# Altium footprint library Package_DFN_QFN.PcbLib: 735 footprints (part 39 of 46)
Each footprint in its own frame and in the unit in brackets; x right, y up, seen from the top. Pads: shape width x height; smd on the part's side, far side on the other; paste and mask are expansions set on the pad; w line width, h text height; cw(c..) or ccw(c..) is an arc to the next point about the centre after c.
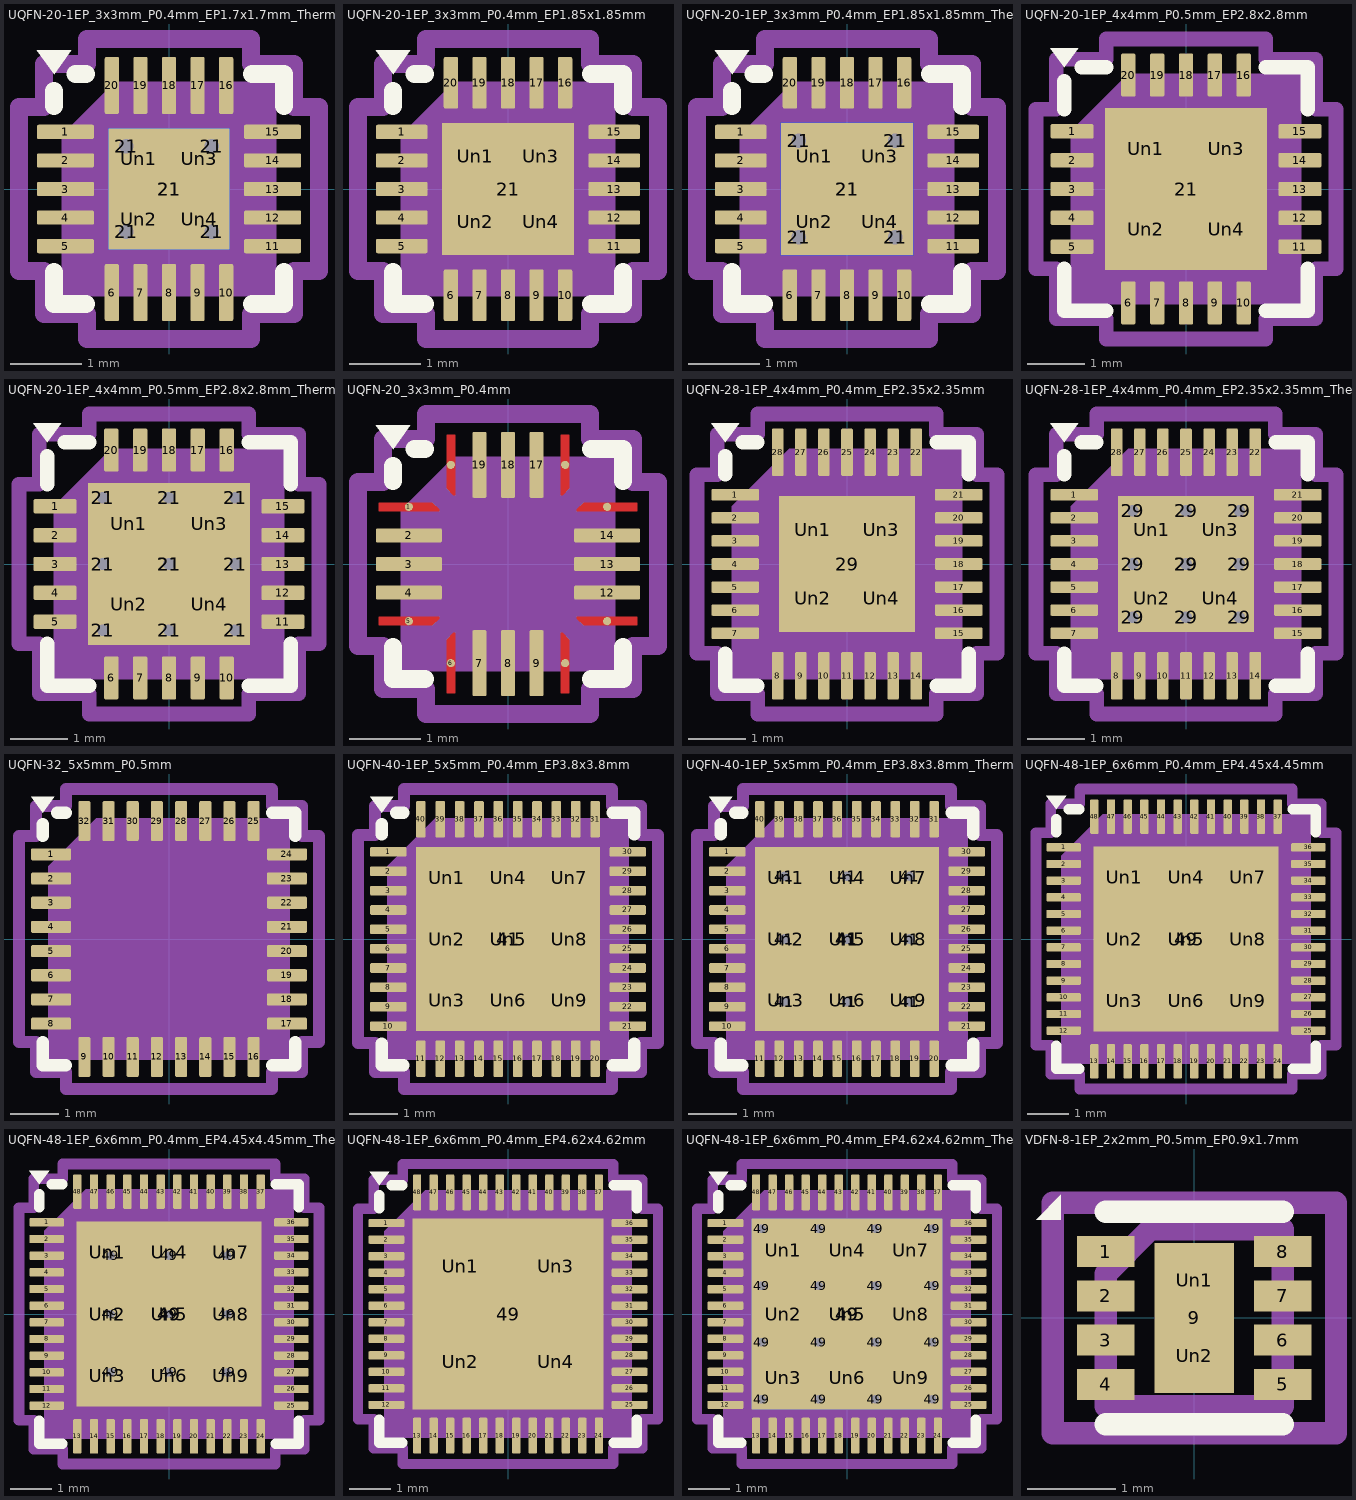
[diagram p38: the footprints below, top view; thin cyan lines are the x and y axes]

## UQFN-20-1EP_3x3mm_P0.4mm_EP1.7x1.7mm_ThermalVias [mm] "UQFN-20-1EP_3x3mm_P0.4mm_EP1.7x1.7mm_ThermalVias"
pads (30):
  rrect25% 0.8x0.2 smd: 1(-1.45,0.8) 2(-1.45,0.4) 3(-1.45,0) 4(-1.45,-0.4) 5(-1.45,-0.8) 11(1.45,-0.8) 12(1.45,-0.4) 13(1.45,0) 14(1.45,0.4) 15(1.45,0.8)
  rrect25% 0.2x0.8 smd: 6(-0.8,-1.45) 7(-0.4,-1.45) 8(0,-1.45) 9(0.4,-1.45) 10(0.8,-1.45) 16(0.8,1.45) 17(0.4,1.45) 18(0,1.45) 19(-0.4,1.45) 20(-0.8,1.45)
  round 0.5 hole 0.2: 21(-0.6,-0.6) 21(-0.6,0.6) 21(0.6,-0.6) 21(0.6,0.6)
  rect 1.7x1.7 smd: 21(0,0)
  rect 1.7x1.7 smd far side: 21(0,0)
  rrect25% 0.74x0.74 on Top Paste: Un1(-0.425,0.425) Un2(-0.425,-0.425) Un3(0.425,0.425) Un4(0.425,-0.425)
F.SilkS:
  region: -1.61,1.61 -1.85,1.94 -1.37,1.94
  lines w0.254: -1.61,-1.16 -1.61,-1.61 -1.16,-1.61 ; -1.61,1.16 -1.61,1.37 ; -1.31,1.61 -1.16,1.61 ; 1.16,-1.61 1.61,-1.61 1.61,-1.16 ; 1.16,1.61 1.61,1.61 1.61,1.16
Top Component Center:
  lines w0.127: -0.127,0 0.127,0 -0.127,0 ; 0,-0.127 0,0.127 0,-0.127
Top Assembly:
  region: 1.5,-1.5 -1.5,-1.5 -1.5,0.75 -0.75,1.5 1.5,1.5
Top Courtyard:
  lines w0.254: -2.1,-1.15 -2.1,1.15 -1.75,1.15 -1.75,1.75 -1.15,1.75 -1.15,2.1 1.15,2.1 1.15,1.75 1.75,1.75 1.75,1.15 2.1,1.15 2.1,-1.15 1.75,-1.15 1.75,-1.75 1.15,-1.75 1.15,-2.1 -1.15,-2.1 -1.15,-1.75 -1.75,-1.75 -1.75,-1.15 -2.1,-1.15
Top Designator:
  text ".Designator" at -3.43,-0.344 h1.52
3D body "UQFN-20-1EP_3x3mm_P0.4mm_EP1.85x1.85mm.step": height 0.52, standoff 0, extent -1.5,-1.5 1.5,1.5

## UQFN-20-1EP_3x3mm_P0.4mm_EP1.85x1.85mm [mm] "UQFN-20-1EP_3x3mm_P0.4mm_EP1.85x1.85mm"
pads (25):
  rrect25% 0.725x0.2 smd: 1(-1.488,0.8) 2(-1.488,0.4) 3(-1.488,0) 4(-1.488,-0.4) 5(-1.488,-0.8) 11(1.488,-0.8) 12(1.488,-0.4) 13(1.488,0) 14(1.488,0.4) 15(1.488,0.8)
  rrect25% 0.2x0.725 smd: 6(-0.8,-1.488) 7(-0.4,-1.488) 8(0,-1.488) 9(0.4,-1.488) 10(0.8,-1.488) 16(0.8,1.488) 17(0.4,1.488) 18(0,1.488) 19(-0.4,1.488) 20(-0.8,1.488)
  rect 1.85x1.85 smd: 21(0,0)
  rrect25% 0.75x0.75 on Top Paste: Un1(-0.46,0.46) Un2(-0.46,-0.46) Un3(0.46,0.46) Un4(0.46,-0.46)
F.SilkS:
  region: -1.61,1.61 -1.85,1.94 -1.37,1.94
  lines w0.254: -1.61,-1.16 -1.61,-1.61 -1.16,-1.61 ; -1.61,1.16 -1.61,1.37 ; -1.31,1.61 -1.16,1.61 ; 1.16,-1.61 1.61,-1.61 1.61,-1.16 ; 1.16,1.61 1.61,1.61 1.61,1.16
Top Component Center:
  lines w0.127: -0.127,0 0.127,0 -0.127,0 ; 0,-0.127 0,0.127 0,-0.127
Top Assembly:
  region: 1.5,-1.5 -1.5,-1.5 -1.5,0.75 -0.75,1.5 1.5,1.5
Top Courtyard:
  lines w0.254: -2.1,-1.15 -1.75,-1.15 -1.75,-1.75 -1.15,-1.75 -1.15,-2.1 1.15,-2.1 1.15,-1.75 1.75,-1.75 1.75,-1.15 2.1,-1.15 2.1,1.15 1.75,1.15 1.75,1.75 1.15,1.75 1.15,2.1 -1.15,2.1 -1.15,1.75 -1.75,1.75 -1.75,1.15 -2.1,1.15 -2.1,-1.15
Top Designator:
  text ".Designator" at -3.43,-0.344 h1.52
3D body "UQFN-20-1EP_3x3mm_P0.4mm_EP1.85x1.85mm.step": height 0.52, standoff 0, extent -1.5,-1.5 1.5,1.5

## UQFN-20-1EP_3x3mm_P0.4mm_EP1.85x1.85mm_ThermalVias [mm] "UQFN-20-1EP_3x3mm_P0.4mm_EP1.85x1.85mm_ThermalVias"
pads (30):
  rrect25% 0.725x0.2 smd: 1(-1.488,0.8) 2(-1.488,0.4) 3(-1.488,0) 4(-1.488,-0.4) 5(-1.488,-0.8) 11(1.488,-0.8) 12(1.488,-0.4) 13(1.488,0) 14(1.488,0.4) 15(1.488,0.8)
  rrect25% 0.2x0.725 smd: 6(-0.8,-1.488) 7(-0.4,-1.488) 8(0,-1.488) 9(0.4,-1.488) 10(0.8,-1.488) 16(0.8,1.488) 17(0.4,1.488) 18(0,1.488) 19(-0.4,1.488) 20(-0.8,1.488)
  round 0.5 hole 0.2: 21(-0.675,-0.675) 21(-0.675,0.675) 21(0.675,-0.675) 21(0.675,0.675)
  rect 1.85x1.85 smd: 21(0,0)
  rect 1.85x1.85 smd far side: 21(0,0)
  rrect25% 0.8x0.8 on Top Paste: Un1(-0.46,0.46) Un2(-0.46,-0.46) Un3(0.46,0.46) Un4(0.46,-0.46)
F.SilkS:
  region: -1.61,1.61 -1.85,1.94 -1.37,1.94
  lines w0.254: -1.61,-1.16 -1.61,-1.61 -1.16,-1.61 ; -1.61,1.16 -1.61,1.37 ; -1.31,1.61 -1.16,1.61 ; 1.16,-1.61 1.61,-1.61 1.61,-1.16 ; 1.16,1.61 1.61,1.61 1.61,1.16
Top Component Center:
  lines w0.127: -0.127,0 0.127,0 -0.127,0 ; 0,-0.127 0,0.127 0,-0.127
Top Assembly:
  region: 1.5,-1.5 -1.5,-1.5 -1.5,0.75 -0.75,1.5 1.5,1.5
Top Courtyard:
  lines w0.254: -2.1,-1.15 -2.1,1.15 -1.75,1.15 -1.75,1.75 -1.15,1.75 -1.15,2.1 1.15,2.1 1.15,1.75 1.75,1.75 1.75,1.15 2.1,1.15 2.1,-1.15 1.75,-1.15 1.75,-1.75 1.15,-1.75 1.15,-2.1 -1.15,-2.1 -1.15,-1.75 -1.75,-1.75 -1.75,-1.15 -2.1,-1.15
Top Designator:
  text ".Designator" at -3.43,-0.344 h1.52
3D body "UQFN-20-1EP_3x3mm_P0.4mm_EP1.85x1.85mm.step": height 0.52, standoff 0, extent -1.5,-1.5 1.5,1.5

## UQFN-20-1EP_4x4mm_P0.5mm_EP2.8x2.8mm [mm] "UQFN-20-1EP_4x4mm_P0.5mm_EP2.8x2.8mm"
pads (25):
  rrect25% 0.75x0.25 smd: 1(-1.975,1) 2(-1.975,0.5) 3(-1.975,0) 4(-1.975,-0.5) 5(-1.975,-1) 11(1.975,-1) 12(1.975,-0.5) 13(1.975,0) 14(1.975,0.5) 15(1.975,1)
  rrect25% 0.25x0.75 smd: 6(-1,-1.975) 7(-0.5,-1.975) 8(0,-1.975) 9(0.5,-1.975) 10(1,-1.975) 16(1,1.975) 17(0.5,1.975) 18(0,1.975) 19(-0.5,1.975) 20(-1,1.975)
  rect 2.8x2.8 smd: 21(0,0)
  rrect22% 1.13x1.13 on Top Paste: Un1(-0.7,0.7) Un2(-0.7,-0.7) Un3(0.7,0.7) Un4(0.7,-0.7)
F.SilkS:
  region: -2.11,2.11 -2.35,2.44 -1.87,2.44
  lines w0.254: -2.11,-1.385 -2.11,-2.11 -1.385,-2.11 ; -2.11,1.385 -2.11,1.87 ; -1.81,2.11 -1.385,2.11 ; 1.385,-2.11 2.11,-2.11 2.11,-1.385 ; 1.385,2.11 2.11,2.11 2.11,1.385
Top Component Center:
  lines w0.127: -0.127,0 0.127,0 -0.127,0 ; 0,-0.127 0,0.127 0,-0.127
Top Assembly:
  region: 2,-2 -2,-2 -2,1 -1,2 2,2
Top Courtyard:
  lines w0.254: -2.6,-1.38 -2.25,-1.38 -2.25,-2.25 -1.38,-2.25 -1.38,-2.6 1.38,-2.6 1.38,-2.25 2.25,-2.25 2.25,-1.38 2.6,-1.38 2.6,1.38 2.25,1.38 2.25,2.25 1.38,2.25 1.38,2.6 -1.38,2.6 -1.38,2.25 -2.25,2.25 -2.25,1.38 -2.6,1.38 -2.6,-1.38
Top Designator:
  text ".Designator" at -3.43,-0.344 h1.52
3D body "UQFN-20-1EP_4x4mm_P0.5mm_EP2.8x2.8mm.step": height 0.62, standoff 0, extent -2,-2 2,2

## UQFN-20-1EP_4x4mm_P0.5mm_EP2.8x2.8mm_ThermalVias [mm] "UQFN-20-1EP_4x4mm_P0.5mm_EP2.8x2.8mm_ThermalVias"
pads (35):
  rrect25% 0.75x0.25 smd: 1(-1.975,1) 2(-1.975,0.5) 3(-1.975,0) 4(-1.975,-0.5) 5(-1.975,-1) 11(1.975,-1) 12(1.975,-0.5) 13(1.975,0) 14(1.975,0.5) 15(1.975,1)
  rrect25% 0.25x0.75 smd: 6(-1,-1.975) 7(-0.5,-1.975) 8(0,-1.975) 9(0.5,-1.975) 10(1,-1.975) 16(1,1.975) 17(0.5,1.975) 18(0,1.975) 19(-0.5,1.975) 20(-1,1.975)
  round 0.5 hole 0.2: 21(-1.15,-1.15) 21(-1.15,0) 21(-1.15,1.15) 21(0,-1.15) 21(0,0) 21(0,1.15) 21(1.15,-1.15) 21(1.15,0) 21(1.15,1.15)
  rect 2.8x2.8 smd: 21(0,0)
  rect 2.8x2.8 smd far side: 21(0,0)
  rrect21% 1.17x1.17 on Top Paste: Un1(-0.7,0.7) Un2(-0.7,-0.7) Un3(0.7,0.7) Un4(0.7,-0.7)
F.SilkS:
  region: -2.11,2.11 -2.35,2.44 -1.87,2.44
  lines w0.254: -2.11,-1.385 -2.11,-2.11 -1.385,-2.11 ; -2.11,1.385 -2.11,1.87 ; -1.81,2.11 -1.385,2.11 ; 1.385,-2.11 2.11,-2.11 2.11,-1.385 ; 1.385,2.11 2.11,2.11 2.11,1.385
Top Component Center:
  lines w0.127: -0.127,0 0.127,0 -0.127,0 ; 0,-0.127 0,0.127 0,-0.127
Top Assembly:
  region: 2,-2 -2,-2 -2,1 -1,2 2,2
Top Courtyard:
  lines w0.254: -2.6,-1.38 -2.6,1.38 -2.25,1.38 -2.25,2.25 -1.38,2.25 -1.38,2.6 1.38,2.6 1.38,2.25 2.25,2.25 2.25,1.38 2.6,1.38 2.6,-1.38 2.25,-1.38 2.25,-2.25 1.38,-2.25 1.38,-2.6 -1.38,-2.6 -1.38,-2.25 -2.25,-2.25 -2.25,-1.38 -2.6,-1.38
Top Designator:
  text ".Designator" at -3.43,-0.344 h1.52
3D body "UQFN-20-1EP_4x4mm_P0.5mm_EP2.8x2.8mm.step": height 0.62, standoff 0, extent -2,-2 2,2

## UQFN-20_3x3mm_P0.4mm [mm] "UQFN-20_3x3mm_P0.4mm"
pads (20):
  round 0.115 smd: 1(-1.388,0.8) 5(-1.388,-0.8) 6(-0.8,-1.388) 10(0.8,-1.388) 11(1.388,-0.8) 15(1.388,0.8) 16(0.8,1.388) 20(-0.8,1.388)
  rrect25% 0.925x0.2 smd: 2(-1.388,0.4) 3(-1.388,0) 4(-1.388,-0.4) 12(1.388,-0.4) 13(1.388,0) 14(1.388,0.4)
  rrect25% 0.2x0.925 smd: 7(-0.4,-1.388) 8(0,-1.388) 9(0.4,-1.388) 17(0.4,1.388) 18(0,1.388) 19(-0.4,1.388)
F.Cu:
  region: -0.74,0.965 -0.763,0.965 -0.86,1.062 -0.86,1.81 -0.74,1.81
  region: 0.86,1.062 0.763,0.965 0.74,0.965 0.74,1.81 0.86,1.81
  region: 1.81,0.74 0.965,0.74 0.965,0.763 1.062,0.86 1.81,0.86
  region: 1.81,-0.86 1.062,-0.86 0.965,-0.763 0.965,-0.74 1.81,-0.74
  region: 0.86,-1.062 0.86,-1.81 0.74,-1.81 0.74,-0.965 0.763,-0.965
  region: -0.74,-1.81 -0.86,-1.81 -0.86,-1.062 -0.763,-0.965 -0.74,-0.965
  region: -0.965,-0.763 -1.062,-0.86 -1.81,-0.86 -1.81,-0.74 -0.965,-0.74
  region: -0.965,0.763 -0.965,0.74 -1.81,0.74 -1.81,0.86 -1.062,0.86
F.SilkS:
  region: -1.61,1.61 -1.85,1.94 -1.37,1.94
  lines w0.254: -1.61,-1.16 -1.61,-1.61 -1.16,-1.61 ; -1.61,1.16 -1.61,1.37 ; -1.31,1.61 -1.16,1.61 ; 1.16,-1.61 1.61,-1.61 1.61,-1.16 ; 1.16,1.61 1.61,1.61 1.61,1.16
F.Paste:
  region: -0.74,0.965 -0.763,0.965 -0.86,1.062 -0.86,1.81 -0.74,1.81
  region: 0.86,1.062 0.763,0.965 0.74,0.965 0.74,1.81 0.86,1.81
  region: 1.81,0.74 0.965,0.74 0.965,0.763 1.062,0.86 1.81,0.86
  region: 1.81,-0.86 1.062,-0.86 0.965,-0.763 0.965,-0.74 1.81,-0.74
  region: 0.86,-1.062 0.86,-1.81 0.74,-1.81 0.74,-0.965 0.763,-0.965
  region: -0.74,-1.81 -0.86,-1.81 -0.86,-1.062 -0.763,-0.965 -0.74,-0.965
  region: -0.965,-0.763 -1.062,-0.86 -1.81,-0.86 -1.81,-0.74 -0.965,-0.74
  region: -0.965,0.763 -0.965,0.74 -1.81,0.74 -1.81,0.86 -1.062,0.86
F.Mask:
  region: -0.74,0.965 -0.763,0.965 -0.86,1.062 -0.86,1.81 -0.74,1.81
  region: 0.86,1.062 0.763,0.965 0.74,0.965 0.74,1.81 0.86,1.81
  region: 1.81,0.74 0.965,0.74 0.965,0.763 1.062,0.86 1.81,0.86
  region: 1.81,-0.86 1.062,-0.86 0.965,-0.763 0.965,-0.74 1.81,-0.74
  region: 0.86,-1.062 0.86,-1.81 0.74,-1.81 0.74,-0.965 0.763,-0.965
  region: -0.74,-1.81 -0.86,-1.81 -0.86,-1.062 -0.763,-0.965 -0.74,-0.965
  region: -0.965,-0.763 -1.062,-0.86 -1.81,-0.86 -1.81,-0.74 -0.965,-0.74
  region: -0.965,0.763 -0.965,0.74 -1.81,0.74 -1.81,0.86 -1.062,0.86
Top Component Center:
  lines w0.127: -0.127,0 0.127,0 -0.127,0 ; 0,-0.127 0,0.127 0,-0.127
Top Assembly:
  region: 1.5,-1.5 -1.5,-1.5 -1.5,0.75 -0.75,1.5 1.5,1.5
Top Courtyard:
  lines w0.254: -2.1,-1.15 -1.75,-1.15 -1.75,-1.75 -1.15,-1.75 -1.15,-2.1 1.15,-2.1 1.15,-1.75 1.75,-1.75 1.75,-1.15 2.1,-1.15 2.1,1.15 1.75,1.15 1.75,1.75 1.15,1.75 1.15,2.1 -1.15,2.1 -1.15,1.75 -1.75,1.75 -1.75,1.15 -2.1,1.15 -2.1,-1.15
Top Designator:
  text ".Designator" at -3.43,-0.344 h1.52

## UQFN-28-1EP_4x4mm_P0.4mm_EP2.35x2.35mm [mm] "UQFN-28-1EP_4x4mm_P0.4mm_EP2.35x2.35mm"
pads (33):
  rrect25% 0.825x0.2 smd: 1(-1.937,1.2) 2(-1.937,0.8) 3(-1.937,0.4) 4(-1.937,0) 5(-1.937,-0.4) 6(-1.937,-0.8) 7(-1.937,-1.2) 15(1.937,-1.2) 16(1.937,-0.8) 17(1.937,-0.4) 18(1.937,0) 19(1.937,0.4) 20(1.937,0.8) 21(1.937,1.2)
  rrect25% 0.2x0.825 smd: 8(-1.2,-1.937) 9(-0.8,-1.937) 10(-0.4,-1.937) 11(0,-1.937) 12(0.4,-1.937) 13(0.8,-1.937) 14(1.2,-1.937) 22(1.2,1.937) 23(0.8,1.937) 24(0.4,1.937) 25(0,1.937) 26(-0.4,1.937) 27(-0.8,1.937) 28(-1.2,1.937)
  rect 2.35x2.35 smd: 29(0,0)
  rrect25% 0.95x0.95 on Top Paste: Un1(-0.59,0.59) Un2(-0.59,-0.59) Un3(0.59,0.59) Un4(0.59,-0.59)
F.SilkS:
  region: -2.11,2.11 -2.35,2.44 -1.87,2.44
  lines w0.254: -2.11,-1.56 -2.11,-2.11 -1.56,-2.11 ; -2.11,1.56 -2.11,1.87 ; -1.81,2.11 -1.56,2.11 ; 1.56,-2.11 2.11,-2.11 2.11,-1.56 ; 1.56,2.11 2.11,2.11 2.11,1.56
Top Component Center:
  lines w0.127: -0.127,0 0.127,0 -0.127,0 ; 0,-0.127 0,0.127 0,-0.127
Top Assembly:
  region: 2,-2 -2,-2 -2,1 -1,2 2,2
Top Courtyard:
  lines w0.254: -2.6,-1.55 -2.25,-1.55 -2.25,-2.25 -1.55,-2.25 -1.55,-2.6 1.55,-2.6 1.55,-2.25 2.25,-2.25 2.25,-1.55 2.6,-1.55 2.6,1.55 2.25,1.55 2.25,2.25 1.55,2.25 1.55,2.6 -1.55,2.6 -1.55,2.25 -2.25,2.25 -2.25,1.55 -2.6,1.55 -2.6,-1.55
Top Designator:
  text ".Designator" at -3.43,-0.344 h1.52
3D body "UQFN-28-1EP_4x4mm_P0.4mm_EP2.35x2.35mm.step": height 0.57, standoff 0, extent -2,-2 2,2

## UQFN-28-1EP_4x4mm_P0.4mm_EP2.35x2.35mm_ThermalVias [mm] "UQFN-28-1EP_4x4mm_P0.4mm_EP2.35x2.35mm_ThermalVias"
pads (43):
  rrect25% 0.825x0.2 smd: 1(-1.937,1.2) 2(-1.937,0.8) 3(-1.937,0.4) 4(-1.937,0) 5(-1.937,-0.4) 6(-1.937,-0.8) 7(-1.937,-1.2) 15(1.937,-1.2) 16(1.937,-0.8) 17(1.937,-0.4) 18(1.937,0) 19(1.937,0.4) 20(1.937,0.8) 21(1.937,1.2)
  rrect25% 0.2x0.825 smd: 8(-1.2,-1.937) 9(-0.8,-1.937) 10(-0.4,-1.937) 11(0,-1.937) 12(0.4,-1.937) 13(0.8,-1.937) 14(1.2,-1.937) 22(1.2,1.937) 23(0.8,1.937) 24(0.4,1.937) 25(0,1.937) 26(-0.4,1.937) 27(-0.8,1.937) 28(-1.2,1.937)
  round 0.5 hole 0.2: 29(-0.925,-0.925) 29(-0.925,0) 29(-0.925,0.925) 29(0,-0.925) 29(0,0) 29(0,0.925) 29(0.925,-0.925) 29(0.925,0) 29(0.925,0.925)
  rect 2.35x2.35 smd: 29(0,0)
  rect 2.35x2.35 smd far side: 29(0,0)
  rrect25% 0.98x0.98 on Top Paste: Un1(-0.59,0.59) Un2(-0.59,-0.59) Un3(0.59,0.59) Un4(0.59,-0.59)
F.SilkS:
  region: -2.11,2.11 -2.35,2.44 -1.87,2.44
  lines w0.254: -2.11,-1.56 -2.11,-2.11 -1.56,-2.11 ; -2.11,1.56 -2.11,1.87 ; -1.81,2.11 -1.56,2.11 ; 1.56,-2.11 2.11,-2.11 2.11,-1.56 ; 1.56,2.11 2.11,2.11 2.11,1.56
Top Component Center:
  lines w0.127: -0.127,0 0.127,0 -0.127,0 ; 0,-0.127 0,0.127 0,-0.127
Top Assembly:
  region: 2,-2 -2,-2 -2,1 -1,2 2,2
Top Courtyard:
  lines w0.254: -2.6,-1.55 -2.6,1.55 -2.25,1.55 -2.25,2.25 -1.55,2.25 -1.55,2.6 1.55,2.6 1.55,2.25 2.25,2.25 2.25,1.55 2.6,1.55 2.6,-1.55 2.25,-1.55 2.25,-2.25 1.55,-2.25 1.55,-2.6 -1.55,-2.6 -1.55,-2.25 -2.25,-2.25 -2.25,-1.55 -2.6,-1.55
Top Designator:
  text ".Designator" at -3.43,-0.344 h1.52
3D body "UQFN-28-1EP_4x4mm_P0.4mm_EP2.35x2.35mm.step": height 0.57, standoff 0, extent -2,-2 2,2

## UQFN-32_5x5mm_P0.5mm [mm] "UQFN-32_5x5mm_P0.5mm"
pads (32):
  rrect25% 0.825x0.25 smd: 1(-2.438,1.75) 2(-2.438,1.25) 3(-2.438,0.75) 4(-2.438,0.25) 5(-2.438,-0.25) 6(-2.438,-0.75) 7(-2.438,-1.25) 8(-2.438,-1.75) 17(2.438,-1.75) 18(2.438,-1.25) 19(2.438,-0.75) 20(2.438,-0.25) 21(2.438,0.25) 22(2.438,0.75) 23(2.438,1.25) 24(2.438,1.75)
  rrect25% 0.25x0.825 smd: 9(-1.75,-2.438) 10(-1.25,-2.438) 11(-0.75,-2.438) 12(-0.25,-2.438) 13(0.25,-2.438) 14(0.75,-2.438) 15(1.25,-2.438) 16(1.75,-2.438) 25(1.75,2.438) 26(1.25,2.438) 27(0.75,2.438) 28(0.25,2.438) 29(-0.25,2.438) 30(-0.75,2.438) 31(-1.25,2.438) 32(-1.75,2.438)
F.SilkS:
  region: -2.61,2.61 -2.85,2.94 -2.37,2.94
  lines w0.254: -2.61,-2.135 -2.61,-2.61 -2.135,-2.61 ; -2.61,2.135 -2.61,2.37 ; -2.31,2.61 -2.135,2.61 ; 2.135,-2.61 2.61,-2.61 2.61,-2.135 ; 2.135,2.61 2.61,2.61 2.61,2.135
Top Component Center:
  lines w0.127: -0.127,0 0.127,0 -0.127,0 ; 0,-0.127 0,0.127 0,-0.127
Top Assembly:
  region: 2.5,-2.5 -2.5,-2.5 -2.5,1.5 -1.5,2.5 2.5,2.5
Top Courtyard:
  lines w0.254: -3.1,-2.13 -3.1,2.13 -2.75,2.13 -2.75,2.75 -2.13,2.75 -2.13,3.1 2.13,3.1 2.13,2.75 2.75,2.75 2.75,2.13 3.1,2.13 3.1,-2.13 2.75,-2.13 2.75,-2.75 2.13,-2.75 2.13,-3.1 -2.13,-3.1 -2.13,-2.75 -2.75,-2.75 -2.75,-2.13 -3.1,-2.13
Top Designator:
  text ".Designator" at -3.43,-0.344 h1.52

## UQFN-40-1EP_5x5mm_P0.4mm_EP3.8x3.8mm [mm] "UQFN-40-1EP_5x5mm_P0.4mm_EP3.8x3.8mm"
pads (50):
  rrect25% 0.75x0.2 smd: 1(-2.475,1.8) 2(-2.475,1.4) 3(-2.475,1) 4(-2.475,0.6) 5(-2.475,0.2) 6(-2.475,-0.2) 7(-2.475,-0.6) 8(-2.475,-1) 9(-2.475,-1.4) 10(-2.475,-1.8) 21(2.475,-1.8) 22(2.475,-1.4) 23(2.475,-1) 24(2.475,-0.6) 25(2.475,-0.2) 26(2.475,0.2) 27(2.475,0.6) 28(2.475,1) 29(2.475,1.4) 30(2.475,1.8)
  rrect25% 0.2x0.75 smd: 11(-1.8,-2.475) 12(-1.4,-2.475) 13(-1,-2.475) 14(-0.6,-2.475) 15(-0.2,-2.475) 16(0.2,-2.475) 17(0.6,-2.475) 18(1,-2.475) 19(1.4,-2.475) 20(1.8,-2.475) 31(1.8,2.475) 32(1.4,2.475) 33(1,2.475) 34(0.6,2.475) 35(0.2,2.475) 36(-0.2,2.475) 37(-0.6,2.475) 38(-1,2.475) 39(-1.4,2.475) 40(-1.8,2.475)
  rect 3.8x3.8 smd: 41(0,0)
  rrect25% 1.02x1.02 on Top Paste: Un1(-1.27,1.27) Un2(-1.27,0) Un3(-1.27,-1.27) Un4(0,1.27) Un5(0,0) Un6(0,-1.27) Un7(1.27,1.27) Un8(1.27,0) Un9(1.27,-1.27)
F.SilkS:
  region: -2.61,2.61 -2.85,2.94 -2.37,2.94
  lines w0.254: -2.61,-2.16 -2.61,-2.61 -2.16,-2.61 ; -2.61,2.16 -2.61,2.37 ; -2.31,2.61 -2.16,2.61 ; 2.16,-2.61 2.61,-2.61 2.61,-2.16 ; 2.16,2.61 2.61,2.61 2.61,2.16
Top Component Center:
  lines w0.127: -0.127,0 0.127,0 -0.127,0 ; 0,-0.127 0,0.127 0,-0.127
Top Assembly:
  region: 2.5,-2.5 -2.5,-2.5 -2.5,1.5 -1.5,2.5 2.5,2.5
Top Courtyard:
  lines w0.254: -3.1,-2.15 -3.1,2.15 -2.75,2.15 -2.75,2.75 -2.15,2.75 -2.15,3.1 2.15,3.1 2.15,2.75 2.75,2.75 2.75,2.15 3.1,2.15 3.1,-2.15 2.75,-2.15 2.75,-2.75 2.15,-2.75 2.15,-3.1 -2.15,-3.1 -2.15,-2.75 -2.75,-2.75 -2.75,-2.15 -3.1,-2.15
Top Designator:
  text ".Designator" at -3.43,-0.344 h1.52
3D body "UQFN-40-1EP_5x5mm_P0.4mm_EP3.8x3.8mm.step": height 0.52, standoff 0, extent -2.5,-2.5 2.5,2.5

## UQFN-40-1EP_5x5mm_P0.4mm_EP3.8x3.8mm_ThermalVias [mm] "UQFN-40-1EP_5x5mm_P0.4mm_EP3.8x3.8mm_ThermalVias"
pads (60):
  rrect25% 0.75x0.2 smd: 1(-2.475,1.8) 2(-2.475,1.4) 3(-2.475,1) 4(-2.475,0.6) 5(-2.475,0.2) 6(-2.475,-0.2) 7(-2.475,-0.6) 8(-2.475,-1) 9(-2.475,-1.4) 10(-2.475,-1.8) 21(2.475,-1.8) 22(2.475,-1.4) 23(2.475,-1) 24(2.475,-0.6) 25(2.475,-0.2) 26(2.475,0.2) 27(2.475,0.6) 28(2.475,1) 29(2.475,1.4) 30(2.475,1.8)
  rrect25% 0.2x0.75 smd: 11(-1.8,-2.475) 12(-1.4,-2.475) 13(-1,-2.475) 14(-0.6,-2.475) 15(-0.2,-2.475) 16(0.2,-2.475) 17(0.6,-2.475) 18(1,-2.475) 19(1.4,-2.475) 20(1.8,-2.475) 31(1.8,2.475) 32(1.4,2.475) 33(1,2.475) 34(0.6,2.475) 35(0.2,2.475) 36(-0.2,2.475) 37(-0.6,2.475) 38(-1,2.475) 39(-1.4,2.475) 40(-1.8,2.475)
  round 0.5 hole 0.2: 41(-1.3,-1.3) 41(-1.3,0) 41(-1.3,1.3) 41(0,-1.3) 41(0,0) 41(0,1.3) 41(1.3,-1.3) 41(1.3,0) 41(1.3,1.3)
  rect 3.8x3.8 smd: 41(0,0)
  rect 3.1x3.1 smd far side: 41(0,0)
  rrect25% 1.02x1.02 on Top Paste: Un1(-1.27,1.27) Un2(-1.27,0) Un3(-1.27,-1.27) Un4(0,1.27) Un5(0,0) Un6(0,-1.27) Un7(1.27,1.27) Un8(1.27,0) Un9(1.27,-1.27)
F.SilkS:
  region: -2.61,2.61 -2.85,2.94 -2.37,2.94
  lines w0.254: -2.61,-2.16 -2.61,-2.61 -2.16,-2.61 ; -2.61,2.16 -2.61,2.37 ; -2.31,2.61 -2.16,2.61 ; 2.16,-2.61 2.61,-2.61 2.61,-2.16 ; 2.16,2.61 2.61,2.61 2.61,2.16
Top Component Center:
  lines w0.127: -0.127,0 0.127,0 -0.127,0 ; 0,-0.127 0,0.127 0,-0.127
Top Assembly:
  region: 2.5,-2.5 -2.5,-2.5 -2.5,1.5 -1.5,2.5 2.5,2.5
Top Courtyard:
  lines w0.254: -3.1,-2.15 -2.75,-2.15 -2.75,-2.75 -2.15,-2.75 -2.15,-3.1 2.15,-3.1 2.15,-2.75 2.75,-2.75 2.75,-2.15 3.1,-2.15 3.1,2.15 2.75,2.15 2.75,2.75 2.15,2.75 2.15,3.1 -2.15,3.1 -2.15,2.75 -2.75,2.75 -2.75,2.15 -3.1,2.15 -3.1,-2.15
Top Designator:
  text ".Designator" at -3.43,-0.344 h1.52
3D body "UQFN-40-1EP_5x5mm_P0.4mm_EP3.8x3.8mm.step": height 0.52, standoff 0, extent -2.5,-2.5 2.5,2.5

## UQFN-48-1EP_6x6mm_P0.4mm_EP4.45x4.45mm [mm] "UQFN-48-1EP_6x6mm_P0.4mm_EP4.45x4.45mm"
pads (58):
  rrect25% 0.825x0.2 smd: 1(-2.937,2.2) 2(-2.937,1.8) 3(-2.937,1.4) 4(-2.937,1) 5(-2.937,0.6) 6(-2.937,0.2) 7(-2.937,-0.2) 8(-2.937,-0.6) 9(-2.937,-1) 10(-2.937,-1.4) 11(-2.937,-1.8) 12(-2.937,-2.2) 25(2.937,-2.2) 26(2.937,-1.8) 27(2.937,-1.4) 28(2.937,-1) 29(2.937,-0.6) 30(2.937,-0.2) 31(2.937,0.2) 32(2.937,0.6) 33(2.937,1) 34(2.937,1.4) 35(2.937,1.8) 36(2.937,2.2)
  rrect25% 0.2x0.825 smd: 13(-2.2,-2.937) 14(-1.8,-2.937) 15(-1.4,-2.937) 16(-1,-2.937) 17(-0.6,-2.937) 18(-0.2,-2.937) 19(0.2,-2.937) 20(0.6,-2.937) 21(1,-2.937) 22(1.4,-2.937) 23(1.8,-2.937) 24(2.2,-2.937) 37(2.2,2.937) 38(1.8,2.937) 39(1.4,2.937) 40(1,2.937) 41(0.6,2.937) 42(0.2,2.937) 43(-0.2,2.937) 44(-0.6,2.937) 45(-1,2.937) 46(-1.4,2.937) 47(-1.8,2.937) 48(-2.2,2.937)
  rect 4.45x4.45 smd: 49(0,0)
  rrect21% 1.2x1.2 on Top Paste: Un1(-1.48,1.48) Un2(-1.48,0) Un3(-1.48,-1.48) Un4(0,1.48) Un5(0,0) Un6(0,-1.48) Un7(1.48,1.48) Un8(1.48,0) Un9(1.48,-1.48)
F.SilkS:
  region: -3.11,3.11 -3.35,3.44 -2.87,3.44
  lines w0.254: -3.11,-2.56 -3.11,-3.11 -2.56,-3.11 ; -3.11,2.56 -3.11,2.87 ; -2.81,3.11 -2.56,3.11 ; 2.56,-3.11 3.11,-3.11 3.11,-2.56 ; 2.56,3.11 3.11,3.11 3.11,2.56
Top Component Center:
  lines w0.127: -0.127,0 0.127,0 -0.127,0 ; 0,-0.127 0,0.127 0,-0.127
Top Assembly:
  region: 3,-3 -3,-3 -3,2 -2,3 3,3
Top Courtyard:
  lines w0.254: -3.6,-2.55 -3.25,-2.55 -3.25,-3.25 -2.55,-3.25 -2.55,-3.6 2.55,-3.6 2.55,-3.25 3.25,-3.25 3.25,-2.55 3.6,-2.55 3.6,2.55 3.25,2.55 3.25,3.25 2.55,3.25 2.55,3.6 -2.55,3.6 -2.55,3.25 -3.25,3.25 -3.25,2.55 -3.6,2.55 -3.6,-2.55
Top Designator:
  text ".Designator" at -3.43,-0.344 h1.52
3D body "UQFN-48-1EP_6x6mm_P0.4mm_EP4.45x4.45mm.step": height 0.92, standoff 0, extent -3,-3 3,3

## UQFN-48-1EP_6x6mm_P0.4mm_EP4.45x4.45mm_ThermalVias [mm] "UQFN-48-1EP_6x6mm_P0.4mm_EP4.45x4.45mm_ThermalVias"
pads (68):
  rrect25% 0.825x0.2 smd: 1(-2.937,2.2) 2(-2.937,1.8) 3(-2.937,1.4) 4(-2.937,1) 5(-2.937,0.6) 6(-2.937,0.2) 7(-2.937,-0.2) 8(-2.937,-0.6) 9(-2.937,-1) 10(-2.937,-1.4) 11(-2.937,-1.8) 12(-2.937,-2.2) 25(2.937,-2.2) 26(2.937,-1.8) 27(2.937,-1.4) 28(2.937,-1) 29(2.937,-0.6) 30(2.937,-0.2) 31(2.937,0.2) 32(2.937,0.6) 33(2.937,1) 34(2.937,1.4) 35(2.937,1.8) 36(2.937,2.2)
  rrect25% 0.2x0.825 smd: 13(-2.2,-2.937) 14(-1.8,-2.937) 15(-1.4,-2.937) 16(-1,-2.937) 17(-0.6,-2.937) 18(-0.2,-2.937) 19(0.2,-2.937) 20(0.6,-2.937) 21(1,-2.937) 22(1.4,-2.937) 23(1.8,-2.937) 24(2.2,-2.937) 37(2.2,2.937) 38(1.8,2.937) 39(1.4,2.937) 40(1,2.937) 41(0.6,2.937) 42(0.2,2.937) 43(-0.2,2.937) 44(-0.6,2.937) 45(-1,2.937) 46(-1.4,2.937) 47(-1.8,2.937) 48(-2.2,2.937)
  round 0.5 hole 0.2: 49(-1.4,-1.4) 49(-1.4,0) 49(-1.4,1.4) 49(0,-1.4) 49(0,0) 49(0,1.4) 49(1.4,-1.4) 49(1.4,0) 49(1.4,1.4)
  rect 4.45x4.45 smd: 49(0,0)
  rect 3.3x3.3 smd far side: 49(0,0)
  rrect21% 1.2x1.2 on Top Paste: Un1(-1.48,1.48) Un2(-1.48,0) Un3(-1.48,-1.48) Un4(0,1.48) Un5(0,0) Un6(0,-1.48) Un7(1.48,1.48) Un8(1.48,0) Un9(1.48,-1.48)
F.SilkS:
  region: -3.11,3.11 -3.35,3.44 -2.87,3.44
  lines w0.254: -3.11,-2.56 -3.11,-3.11 -2.56,-3.11 ; -3.11,2.56 -3.11,2.87 ; -2.81,3.11 -2.56,3.11 ; 2.56,-3.11 3.11,-3.11 3.11,-2.56 ; 2.56,3.11 3.11,3.11 3.11,2.56
Top Component Center:
  lines w0.127: -0.127,0 0.127,0 -0.127,0 ; 0,-0.127 0,0.127 0,-0.127
Top Assembly:
  region: 3,-3 -3,-3 -3,2 -2,3 3,3
Top Courtyard:
  lines w0.254: -3.6,-2.55 -3.6,2.55 -3.25,2.55 -3.25,3.25 -2.55,3.25 -2.55,3.6 2.55,3.6 2.55,3.25 3.25,3.25 3.25,2.55 3.6,2.55 3.6,-2.55 3.25,-2.55 3.25,-3.25 2.55,-3.25 2.55,-3.6 -2.55,-3.6 -2.55,-3.25 -3.25,-3.25 -3.25,-2.55 -3.6,-2.55
Top Designator:
  text ".Designator" at -3.43,-0.344 h1.52
3D body "UQFN-48-1EP_6x6mm_P0.4mm_EP4.45x4.45mm.step": height 0.92, standoff 0, extent -3,-3 3,3

## UQFN-48-1EP_6x6mm_P0.4mm_EP4.62x4.62mm [mm] "UQFN-48-1EP_6x6mm_P0.4mm_EP4.62x4.62mm"
pads (53):
  rrect25% 0.865x0.2 smd: 1(-2.943,2.2) 2(-2.943,1.8) 3(-2.943,1.4) 4(-2.943,1) 5(-2.943,0.6) 6(-2.943,0.2) 7(-2.943,-0.2) 8(-2.943,-0.6) 9(-2.943,-1) 10(-2.943,-1.4) 11(-2.943,-1.8) 12(-2.943,-2.2) 25(2.943,-2.2) 26(2.943,-1.8) 27(2.943,-1.4) 28(2.943,-1) 29(2.943,-0.6) 30(2.943,-0.2) 31(2.943,0.2) 32(2.943,0.6) 33(2.943,1) 34(2.943,1.4) 35(2.943,1.8) 36(2.943,2.2)
  rrect25% 0.2x0.865 smd: 13(-2.2,-2.943) 14(-1.8,-2.943) 15(-1.4,-2.943) 16(-1,-2.943) 17(-0.6,-2.943) 18(-0.2,-2.943) 19(0.2,-2.943) 20(0.6,-2.943) 21(1,-2.943) 22(1.4,-2.943) 23(1.8,-2.943) 24(2.2,-2.943) 37(2.2,2.943) 38(1.8,2.943) 39(1.4,2.943) 40(1,2.943) 41(0.6,2.943) 42(0.2,2.943) 43(-0.2,2.943) 44(-0.6,2.943) 45(-1,2.943) 46(-1.4,2.943) 47(-1.8,2.943) 48(-2.2,2.943)
  rect 4.62x4.62 smd: 49(0,0)
  rrect13% 1.86x1.86 on Top Paste: Un1(-1.155,1.155) Un2(-1.155,-1.155) Un3(1.155,1.155) Un4(1.155,-1.155)
F.SilkS:
  region: -3.11,3.11 -3.35,3.44 -2.87,3.44
  lines w0.254: -3.11,-2.56 -3.11,-3.11 -2.56,-3.11 ; -3.11,2.56 -3.11,2.87 ; -2.81,3.11 -2.56,3.11 ; 2.56,-3.11 3.11,-3.11 3.11,-2.56 ; 2.56,3.11 3.11,3.11 3.11,2.56
Top Component Center:
  lines w0.127: -0.127,0 0.127,0 -0.127,0 ; 0,-0.127 0,0.127 0,-0.127
Top Assembly:
  region: 3,-3 -3,-3 -3,2 -2,3 3,3
Top Courtyard:
  lines w0.254: -3.63,-2.55 -3.63,2.55 -3.25,2.55 -3.25,3.25 -2.55,3.25 -2.55,3.63 2.55,3.63 2.55,3.25 3.25,3.25 3.25,2.55 3.63,2.55 3.63,-2.55 3.25,-2.55 3.25,-3.25 2.55,-3.25 2.55,-3.63 -2.55,-3.63 -2.55,-3.25 -3.25,-3.25 -3.25,-2.55 -3.63,-2.55
Top Designator:
  text ".Designator" at -3.43,-0.344 h1.52
3D body "UQFN-48-1EP_6x6mm_P0.4mm_EP4.45x4.45mm.step": height 0.92, standoff 0, extent -3,-3 3,3

## UQFN-48-1EP_6x6mm_P0.4mm_EP4.62x4.62mm_ThermalVias [mm] "UQFN-48-1EP_6x6mm_P0.4mm_EP4.62x4.62mm_ThermalVias"
pads (75):
  rrect25% 0.865x0.2 smd: 1(-2.943,2.2) 2(-2.943,1.8) 3(-2.943,1.4) 4(-2.943,1) 5(-2.943,0.6) 6(-2.943,0.2) 7(-2.943,-0.2) 8(-2.943,-0.6) 9(-2.943,-1) 10(-2.943,-1.4) 11(-2.943,-1.8) 12(-2.943,-2.2) 25(2.943,-2.2) 26(2.943,-1.8) 27(2.943,-1.4) 28(2.943,-1) 29(2.943,-0.6) 30(2.943,-0.2) 31(2.943,0.2) 32(2.943,0.6) 33(2.943,1) 34(2.943,1.4) 35(2.943,1.8) 36(2.943,2.2)
  rrect25% 0.2x0.865 smd: 13(-2.2,-2.943) 14(-1.8,-2.943) 15(-1.4,-2.943) 16(-1,-2.943) 17(-0.6,-2.943) 18(-0.2,-2.943) 19(0.2,-2.943) 20(0.6,-2.943) 21(1,-2.943) 22(1.4,-2.943) 23(1.8,-2.943) 24(2.2,-2.943) 37(2.2,2.943) 38(1.8,2.943) 39(1.4,2.943) 40(1,2.943) 41(0.6,2.943) 42(0.2,2.943) 43(-0.2,2.943) 44(-0.6,2.943) 45(-1,2.943) 46(-1.4,2.943) 47(-1.8,2.943) 48(-2.2,2.943)
  round 0.5 hole 0.2: 49(-2.06,-2.06) 49(-2.06,-0.687) 49(-2.06,0.687) 49(-2.06,2.06) 49(-0.687,-2.06) 49(-0.687,-0.687) 49(-0.687,0.687) 49(-0.687,2.06) 49(0.687,-2.06) 49(0.687,-0.687) 49(0.687,0.687) 49(0.687,2.06) 49(2.06,-2.06) 49(2.06,-0.687) 49(2.06,0.687) 49(2.06,2.06)
  rect 4.62x4.62 smd: 49(0,0)
  rect 4.62x4.62 smd far side: 49(0,0)
  rrect21% 1.19x1.19 on Top Paste: Un1(-1.54,1.54) Un2(-1.54,0) Un3(-1.54,-1.54) Un4(0,1.54) Un5(0,0) Un6(0,-1.54) Un7(1.54,1.54) Un8(1.54,0) Un9(1.54,-1.54)
F.SilkS:
  region: -3.11,3.11 -3.35,3.44 -2.87,3.44
  lines w0.254: -3.11,-2.56 -3.11,-3.11 -2.56,-3.11 ; -3.11,2.56 -3.11,2.87 ; -2.81,3.11 -2.56,3.11 ; 2.56,-3.11 3.11,-3.11 3.11,-2.56 ; 2.56,3.11 3.11,3.11 3.11,2.56
Top Component Center:
  lines w0.127: -0.127,0 0.127,0 -0.127,0 ; 0,-0.127 0,0.127 0,-0.127
Top Assembly:
  region: 3,-3 -3,-3 -3,2 -2,3 3,3
Top Courtyard:
  lines w0.254: -3.63,-2.55 -3.63,2.55 -3.25,2.55 -3.25,3.25 -2.55,3.25 -2.55,3.63 2.55,3.63 2.55,3.25 3.25,3.25 3.25,2.55 3.63,2.55 3.63,-2.55 3.25,-2.55 3.25,-3.25 2.55,-3.25 2.55,-3.63 -2.55,-3.63 -2.55,-3.25 -3.25,-3.25 -3.25,-2.55 -3.63,-2.55
Top Designator:
  text ".Designator" at -3.43,-0.344 h1.52
3D body "UQFN-48-1EP_6x6mm_P0.4mm_EP4.45x4.45mm.step": height 0.92, standoff 0, extent -3,-3 3,3

## VDFN-8-1EP_2x2mm_P0.5mm_EP0.9x1.7mm [mm] "VDFN-8-1EP_2x2mm_P0.5mm_EP0.9x1.7mm"
pads (11):
  rect 0.65x0.35 smd: 1(-1,0.75) 2(-1,0.25) 3(-1,-0.25) 4(-1,-0.75) 5(1,-0.75) 6(1,-0.25) 7(1,0.25) 8(1,0.75)
  rect 0.9x1.7 smd: 9(0,0)
  rect 0.72x0.69 on Top Paste: Un1(0,0.425) Un2(0,-0.425)
F.SilkS:
  region: -1.51,1.11 -1.79,1.11 -1.51,1.39
  lines w0.254: -1,-1.2 1,-1.2 ; -1,1.2 1,1.2
Top Component Center:
  lines w0.127: -0.127,0 0.127,0 -0.127,0 ; 0,-0.127 0,0.127 0,-0.127
Top Assembly:
  lines w0.254: -1,-1 -1,0.5 -0.5,1 1,1 1,-1 -1,-1
Top Courtyard:
  lines w0.254: -1.6,-1.3 -1.6,1.3 1.6,1.3 1.6,-1.3 -1.6,-1.3
Top Designator:
  text ".Designator" at -2.251,-0.226 h1
3D body "VDFN-8-1EP_2x2mm_P0.5mm_EP0.9x1.7mm.step": height 0.77, standoff 0, extent -1,-0.99 1,0.99